# Altium schematic symbol library stmf446re_schematic.SchLib: 2 symbols
Pins are listed as number, name and electrical type; pins without a type are passive.

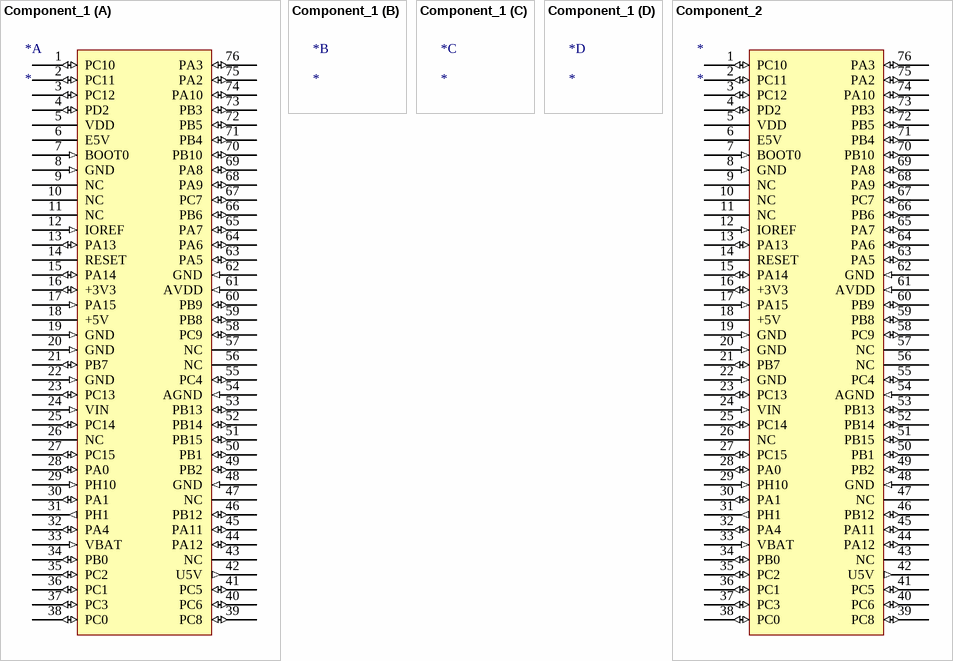
[diagram p0: symbols Component_1 to Component_2]

## Component_1
designator *
footprint PCBComponent_1
part A pins: 1 PC10 (io), 2 PC11 (io), 3 PC12 (io), 4 PD2 (io), 5 VDD (power), 6 E5V (power), 7 BOOT0 (in), 8 GND (in), 9 NC, 10 NC, 11 NC, 12 IOREF (in), 13 PA13 (io), 14 RESET, 15 PA14 (io), 16 +3V3 (io), 17 PA15 (in), 18 +5V (power), 19 GND (in), 20 GND (in), 21 PB7 (io), 22 GND (in), 23 PC13 (io), 24 VIN (in), 25 PC14 (io), 26 NC (power), 27 PC15 (io), 28 PA0 (io), 29 PH10 (in), 30 PA1 (io), 31 PH1 (out), 32 PA4 (io), 33 VBAT (in), 34 PB0 (io), 35 PC2 (io), 36 PC1 (io), 37 PC3 (io), 38 PC0 (io), 39 PC8 (io), 40 PC6 (io), 41 PC5 (io), 42 U5V (out), 43 NC, 44 PA12 (io), 45 PA11 (io), 46 PB12 (io), 47 NC, 48 GND (in), 49 PB2 (io), 50 PB1 (io), 51 PB15 (io), 52 PB14 (io), 53 PB13 (io), 54 AGND (in), 55 PC4 (io), 56 NC, 57 NC, 58 PC9 (io), 59 PB8 (io), 60 PB9 (io), 61 AVDD (in), 62 GND (in), 63 PA5 (io), 64 PA6 (io), 65 PA7 (io), 66 PB6 (io), 67 PC7 (io), 68 PA9 (io), 69 PA8 (io), 70 PB10 (io), 71 PB4 (io), 72 PB5 (io), 73 PB3 (io), 74 PA10 (io), 75 PA2 (io), 76 PA3 (io)

## Component_2
designator *
footprint Model Name (Footprint not found)
pins: 1 PC10 (io), 2 PC11 (io), 3 PC12 (io), 4 PD2 (io), 5 VDD (power), 6 E5V (power), 7 BOOT0 (in), 8 GND (in), 9 NC, 10 NC, 11 NC, 12 IOREF (in), 13 PA13 (io), 14 RESET, 15 PA14 (io), 16 +3V3 (io), 17 PA15 (in), 18 +5V (power), 19 GND (in), 20 GND (in), 21 PB7 (io), 22 GND (in), 23 PC13 (io), 24 VIN (in), 25 PC14 (io), 26 NC (power), 27 PC15 (io), 28 PA0 (io), 29 PH10 (in), 30 PA1 (io), 31 PH1 (out), 32 PA4 (io), 33 VBAT (in), 34 PB0 (io), 35 PC2 (io), 36 PC1 (io), 37 PC3 (io), 38 PC0 (io), 39 PC8 (io), 40 PC6 (io), 41 PC5 (io), 42 U5V (out), 43 NC, 44 PA12 (io), 45 PA11 (io), 46 PB12 (io), 47 NC, 48 GND (in), 49 PB2 (io), 50 PB1 (io), 51 PB15 (io), 52 PB14 (io), 53 PB13 (io), 54 AGND (in), 55 PC4 (io), 56 NC, 57 NC, 58 PC9 (io), 59 PB8 (io), 60 PB9 (io), 61 AVDD (in), 62 GND (in), 63 PA5 (io), 64 PA6 (io), 65 PA7 (io), 66 PB6 (io), 67 PC7 (io), 68 PA9 (io), 69 PA8 (io), 70 PB10 (io), 71 PB4 (io), 72 PB5 (io), 73 PB3 (io), 74 PA10 (io), 75 PA2 (io), 76 PA3 (io)